# Altium footprint library mod_wireless.PcbLib: 38 footprints (part 2 of 3)
Each footprint in its own frame and in the unit in brackets; x right, y up, seen from the top. Pads: shape width x height; smd on the part's side, far side on the other; paste and mask are expansions set on the pad; w line width, h text height; cw(c..) or ccw(c..) is an arc to the next point about the centre after c.
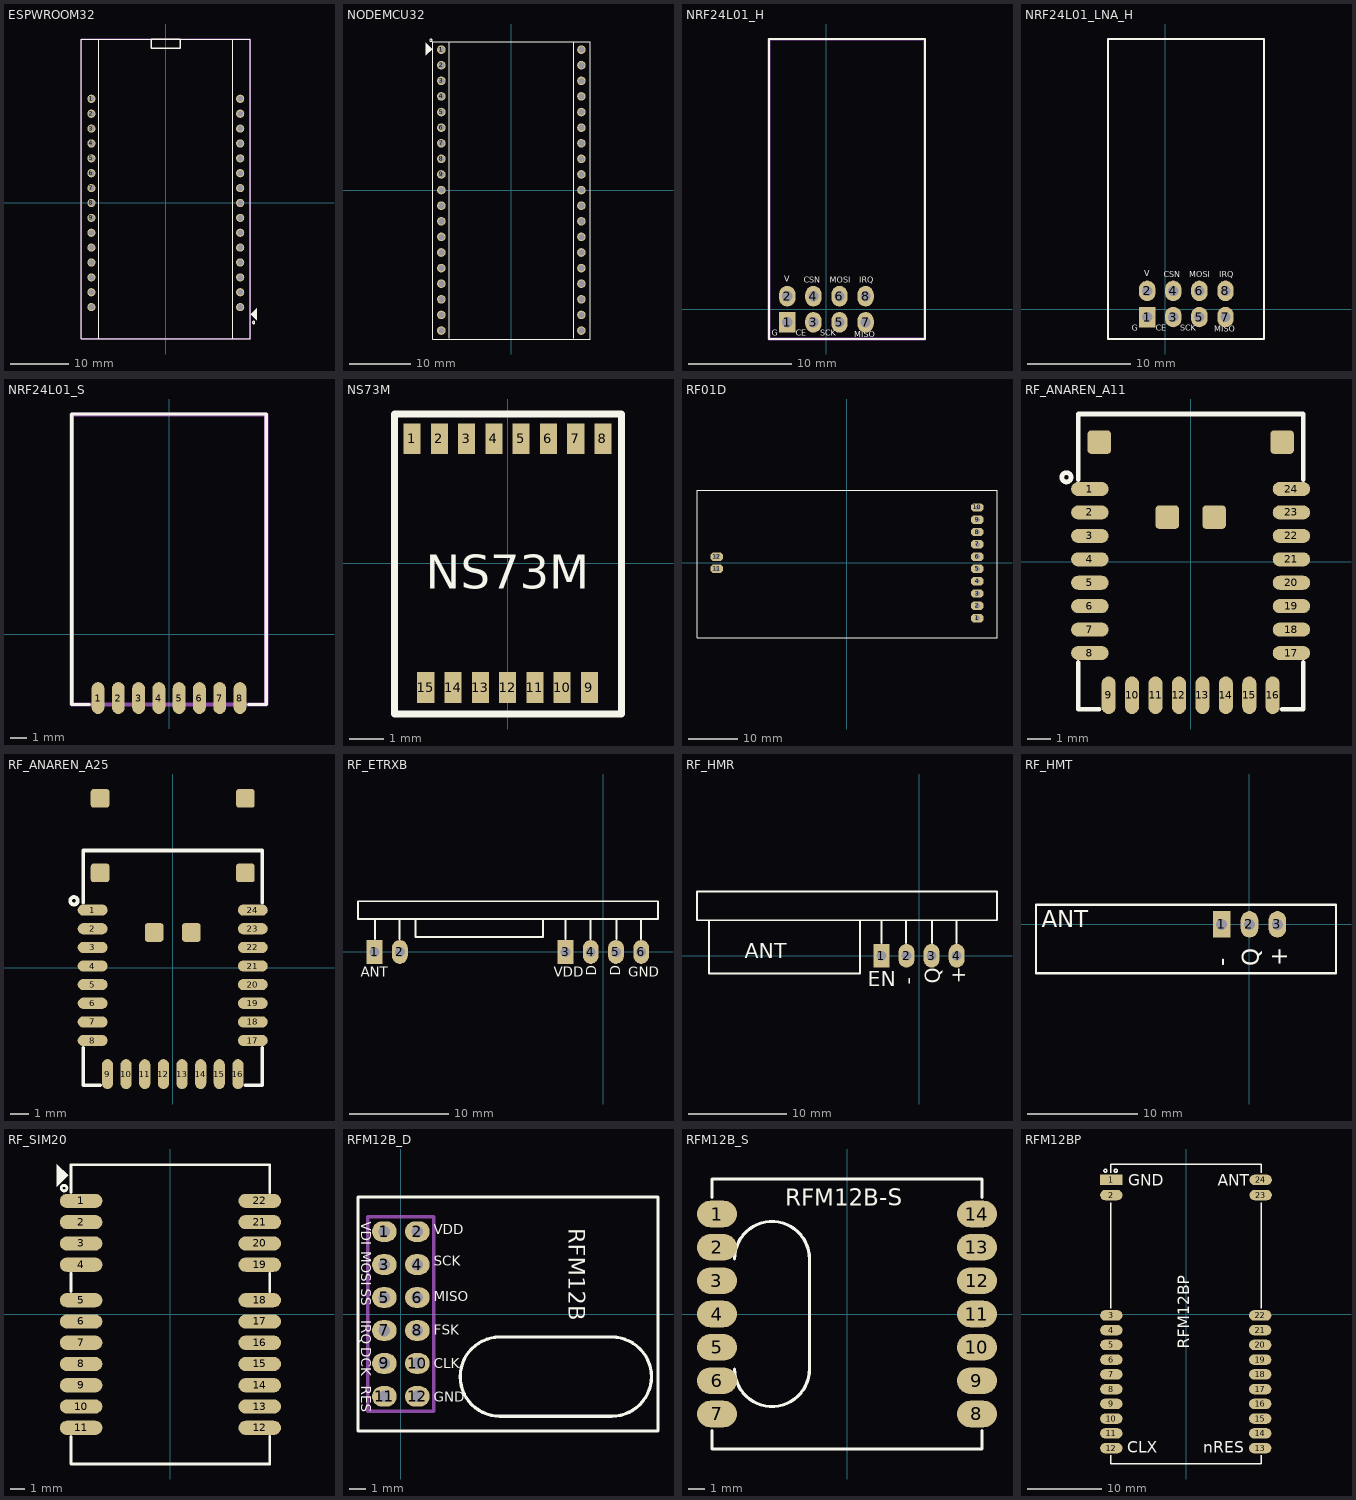
[diagram p1: the footprints below, top view; thin cyan lines are the x and y axes]

## ESPWROOM32 [mm] "ESP-WROOM-32"
pads (30):
  round 1.4 / inner round 1.4 / far side oval 2.2x1.4 hole 1: 1(-12.7,17.78) 2(-12.7,15.24) 3(-12.7,12.7) 4(-12.7,10.16) 5(-12.7,7.62) 6(-12.7,5.08) 7(-12.7,2.54) 8(-12.7,0) 9(-12.7,-2.54) 10(-12.7,-5.08) 11(-12.7,-7.62) 12(-12.7,-10.16) 13(-12.7,-12.7) 14(-12.7,-15.24) 15(-12.7,-17.78) 16(12.7,-17.78) 17(12.7,-15.24) 18(12.7,-12.7) 19(12.7,-10.16) 20(12.7,-7.62) 21(12.7,-5.08) 22(12.7,-2.54) 23(12.7,0) 24(12.7,2.54) 25(12.7,5.08) 26(12.7,7.62) 27(12.7,10.16) 28(12.7,12.7) 29(12.7,15.24) 30(12.7,17.78)
Top Overlay:
  circle w0.2: c15,-20.41 r0.2
  region: 14.5,-18.98 15.5,-19.98 15.5,-17.98
  lines w0.2: -11.43,-23.22 -11.43,27.98 ; 11.43,-23.22 11.43,27.98 ; -14.4,-23.22 14.4,-23.22 14.4,27.98 -14.4,27.98 -14.4,-23.22
  lines w0.254: -0.011,26.427 -2.453,26.427 -2.453,27.98 0,27.98 2.453,27.98 2.453,26.427 0.011,26.427
Top Component (Mech14):
  lines w0.254: -14.402,-23.19 -14.376,-23.216 14.376,-23.216 14.376,27.991 14.351,27.965 -14.376,27.965 -14.402,27.94 -14.402,-23.19
  text ".Designator" at 0.838,0.559 h2.03
3D body "PBD-2.stp": height 8.5, standoff -3.15, extent 11.43,-16.49 13.97,-11.41
3D body "PBD-2.stp": height 8.5, standoff -3.15, extent -13.97,-16.49 -11.43,-11.41
3D body "PBD-2.stp": height 8.5, standoff -3.15, extent -13.97,-11.41 -11.43,-6.33
3D body "PBD-2.stp": height 8.5, standoff -3.15, extent -13.97,-6.33 -11.43,-1.25
3D body "PBD-2.stp": height 8.5, standoff -3.15, extent -13.97,-1.25 -11.43,3.83
3D body "PBD-2.stp": height 8.5, standoff -3.15, extent -13.97,3.83 -11.43,8.91
3D body "PBD-2.stp": height 8.5, standoff -3.15, extent -13.97,8.91 -11.43,13.99
3D body "PBD-2.stp": height 8.5, standoff -3.15, extent -13.97,13.99 -11.43,19.07
3D body "PBS-1.stp": height 8.5, standoff -3.15, extent -13.97,-19.01 -11.43,-16.47
3D body "PBS-1.stp": height 8.5, standoff -3.15, extent 11.43,-19.01 13.97,-16.47
3D body "PBD-2.stp": height 8.5, standoff -3.15, extent 11.43,13.99 13.97,19.07
3D body "PBD-2.stp": height 8.5, standoff -3.15, extent 11.43,8.91 13.97,13.99
3D body "PBD-2.stp": height 8.5, standoff -3.15, extent 11.43,3.83 13.97,8.91
3D body "PBD-2.stp": height 8.5, standoff -3.15, extent 11.43,-1.25 13.97,3.83
3D body "PBD-2.stp": height 8.5, standoff -3.15, extent 11.43,-6.33 13.97,-1.25
3D body "PBD-2.stp": height 8.5, standoff -3.15, extent 11.43,-11.41 13.97,-6.33
3D body "ESP-32_v1.STEP": height 15.9, standoff 3.5, extent -14.25,-22.95 14.25,27.98

## NODEMCU32 [mm] "NodeMCU-32s ESP-32s, 48.26x25.4mm"
pads (38):
  round 1.4 / inner round 1.4 / far side oval 2.2x1.4 hole 1: 1(-11.4,22.9) 2(-11.4,20.36) 3(-11.4,17.82) 4(-11.4,15.28) 5(-11.4,12.74) 6(-11.4,10.2) 7(-11.4,7.66) 8(-11.4,5.12) 9(-11.4,2.58) 10(-11.4,0.04) 11(-11.4,-2.5) 12(-11.4,-5.04) 13(-11.4,-7.58) 14(-11.4,-10.12) 15(-11.4,-12.66) 16(-11.4,-15.2) 17(-11.4,-17.74) 18(-11.4,-20.28) 19(-11.4,-22.82) 20(11.4,-22.82) 21(11.4,-20.28) 22(11.4,-17.74) 23(11.4,-15.2) 24(11.4,-12.66) 25(11.4,-10.12) 26(11.4,-7.58) 27(11.4,-5.04) 28(11.4,-2.5) 29(11.4,0.04) 30(11.4,2.58) 31(11.4,5.12) 32(11.4,7.66) 33(11.4,10.2) 34(11.4,12.74) 35(11.4,15.28) 36(11.4,17.82) 37(11.4,20.36) 38(11.4,22.9)
Top Overlay:
  circle w0.2: c-13.1,24.43 r0.2
  region: -12.9,23 -13.9,24 -13.9,22
  lines w0.2: -10.13,-24.09 -10.13,24.17 ; 10.13,-24.09 10.13,24.17 ; -12.8,-24.2 12.8,-24.2 12.8,24.2 -12.8,24.2 -12.8,-24.2
3D body "PBD-2.stp": height 8.5, standoff -3.15, extent 10.13,-21.55 12.67,-16.47
3D body "PBD-2.stp": height 8.5, standoff -3.15, extent 10.13,-16.47 12.67,-11.39
3D body "PBD-2.stp": height 8.5, standoff -3.15, extent 10.13,-11.39 12.67,-6.31
3D body "PBD-2.stp": height 8.5, standoff -3.15, extent 10.13,-6.31 12.67,-1.23
3D body "PBD-2.stp": height 8.5, standoff -3.15, extent 10.13,-1.23 12.67,3.85
3D body "PBD-2.stp": height 8.5, standoff -3.15, extent 10.13,3.85 12.67,8.93
3D body "PBD-2.stp": height 8.5, standoff -3.15, extent 10.13,8.93 12.67,14.01
3D body "PBD-2.stp": height 8.5, standoff -3.15, extent 10.13,14.01 12.67,19.09
3D body "PBD-2.stp": height 8.5, standoff -3.15, extent 10.13,19.09 12.67,24.17
3D body "PBS-1.stp": height 8.5, standoff -3.15, extent 10.13,-24.09 12.67,-21.55
3D body "PBS-1.stp": height 8.5, standoff -3.15, extent -12.67,-24.09 -10.13,-21.55
3D body "PBD-2.stp": height 8.5, standoff -3.15, extent -12.67,19.09 -10.13,24.17
3D body "PBD-2.stp": height 8.5, standoff -3.15, extent -12.67,14.01 -10.13,19.09
3D body "PBD-2.stp": height 8.5, standoff -3.15, extent -12.67,8.93 -10.13,14.01
3D body "PBD-2.stp": height 8.5, standoff -3.15, extent -12.67,3.85 -10.13,8.93
3D body "PBD-2.stp": height 8.5, standoff -3.15, extent -12.67,-1.23 -10.13,3.85
3D body "PBD-2.stp": height 8.5, standoff -3.15, extent -12.67,-6.31 -10.13,-1.23
3D body "PBD-2.stp": height 8.5, standoff -3.15, extent -12.67,-11.39 -10.13,-6.31
3D body "PBD-2.stp": height 8.5, standoff -3.15, extent -12.67,-16.47 -10.13,-11.39
3D body "PBD-2.stp": height 8.5, standoff -3.15, extent -12.67,-21.55 -10.13,-16.47
3D body "User Library-ESP32S Dev Board 0_9inch width ASSY.step": height 17.6, standoff 4.46, extent -12.954,-24.257 12.954,25.057

## NRF24L01_H [mm] "MODULE, WIRELESS, NRF24L01 HEADER 2X8"
pads (8):
  rect 1.6x2 hole 1: 1(-3.81,-1.27)
  oval 1.6x2 hole 1: 2(-3.81,1.27) 3(-1.27,-1.27) 4(-1.27,1.27) 5(1.27,-1.27) 6(1.27,1.27) 7(3.81,-1.27) 8(3.81,1.27)
Top Overlay:
  lines w0.2: -5.6,-2.9 9.6,-2.9 9.6,26.3 -5.6,26.3 -5.6,-2.9
  text "V" at -4.1,2.5 h1
  text "G" at -5.3,-2.8 h1
  text "CSN" at -2.2,2.4 h1
  text "CE" at -3,-2.8 h1
  text "SCK" at -0.6,-2.8 h1
  text "MISO" at 2.7,-2.9 h1
  text "MOSI" at 0.3,2.4 h1
  text "IRQ" at 3.2,2.4 h1
Top Component (Mech14):
  lines w0.254: -5.588,-2.896 -5.588,26.289 9.576,26.289 9.576,-2.896 -5.588,-2.896
  text ".Designator" at -1.245,-0.584 h2.03
3D body "NRF24L01P.STEP": height 3.5, standoff -11.41, extent -5.468,-2.794 9.532,26.206

## NRF24L01_LNA_H [mm] "MODULE, WIRELESS, NRF24L01 HEADER 2X8"
pads (8):
  rect 1.6x2 hole 1: 1(-1.778,-0.762)
  oval 1.6x2 hole 1: 2(-1.778,1.778) 3(0.762,-0.762) 4(0.762,1.778) 5(3.302,-0.762) 6(3.302,1.778) 7(5.842,-0.762) 8(5.842,1.778)
Top Overlay:
  lines w0.2: -5.6,-2.9 -5.6,26.3 9.6,26.3 9.6,-2.9 -5.6,-2.9
  text "IRQ" at 5.232,2.908 h1
  text "MOSI" at 2.332,2.908 h1
  text "MISO" at 4.732,-2.392 h1
  text "SCK" at 1.432,-2.292 h1
  text "CE" at -0.968,-2.292 h1
  text "CSN" at -0.168,2.908 h1
  text "G" at -3.268,-2.292 h1
  text "V" at -2.068,3.008 h1
3D body "User Library-NRF24+SMA.STEP": height 92.98, standoff -4.55, extent -5.715,-2.921 9.685,71.939

## NRF24L01_S [mm] "MODULE, WIRELESS, NRF24L01+ smd Module"
pads (8):
  oval 0.8x2 smd: 1(-4.445,-4) 2(-3.175,-4) 3(-1.905,-4) 4(-0.635,-4) 5(0.635,-4) 6(1.905,-4) 7(3.175,-4) 8(4.445,-4)
Top Overlay:
  lines w0.2: -5,-4.4 -6.1,-4.4 -6.1,13.8 6.1,13.8 6.1,-4.4 5,-4.4
Top Component (Mech14):
  lines w0.254: -6.096,-4.394 6.096,-4.394 6.096,13.767 -6.096,13.767 -6.096,-4.394
  text ".Designator" at -0.991,-0.584 h2.03
3D body "NRF24L01+ smd Module.step": height 0.8, standoff 0, extent -6,-4.3 6,13.7

## NS73M [mm]
pads (15):
  rect 0.5x0.9 smd: 1(-2.8,3.65) 2(-2,3.65) 3(-1.2,3.65) 4(-0.4,3.65) 5(0.4,3.65) 6(1.2,3.65) 7(2,3.65) 8(2.8,3.65) 9(2.4,-3.65) 10(1.6,-3.65) 11(0.8,-3.65) 12(0,-3.65) 13(-0.8,-3.65) 14(-1.6,-3.65) 15(-2.4,-3.65)
Top Overlay:
  lines w0.2: -3.321,-4.427 3.347,-4.427 3.347,4.374 -3.321,4.374 -3.321,-4.427
  text "NS73M" at -2.394,-0.757 h1

## RF01D [mm]
pads (12):
  oct 2.5x1.7 hole 1: 1(26.5,-11.25) 2(26.5,-8.75) 3(26.5,-6.25) 4(26.5,-3.75) 5(26.5,-1.25) 6(26.5,1.25) 7(26.5,3.75) 8(26.5,6.25) 9(26.5,8.75) 10(26.5,11.25) 11(-26.5,-1.25) 12(-26.5,1.25)
Top Overlay:
  lines w0.25: -30.5,-15.25 -30.5,14.75 30.5,14.75 30.5,-15.25 -30.5,-15.25

## RF_ANAREN_A11 [mm] "RF MODULE, ANAREN, 2.4GHz,"
pads (28):
  oval 1.6x0.6 smd mask+0.1: 1(-4.3,3.1) 2(-4.3,2.1) 3(-4.3,1.1) 4(-4.3,0.1) 5(-4.3,-0.9) 6(-4.3,-1.9) 7(-4.3,-2.9) 8(-4.3,-3.9) 17(4.3,-3.9) 18(4.3,-2.9) 19(4.3,-1.9) 20(4.3,-0.9) 21(4.3,0.1) 22(4.3,1.1) 23(4.3,2.1) 24(4.3,3.1)
  oval 0.6x1.6 smd mask+0.1: 9(-3.5,-5.7) 10(-2.5,-5.7) 11(-1.5,-5.7) 12(-0.5,-5.7) 13(0.5,-5.7) 14(1.5,-5.7) 15(2.5,-5.7) 16(3.5,-5.7)
  rrect30% 1x1 smd mask+0.1: ""(-3.9,5.1) ""(-1,1.9) ""(1,1.9) ""(3.9,5.1)
Top Overlay:
  circle w0.2: c-5.3,3.6 r0.2
  lines w0.2: -4.8,-4.3 -4.8,-6.3 -3.9,-6.3 ; -4.8,3.5 -4.8,6.3 4.8,6.3 4.8,3.5 ; 3.9,-6.3 4.8,-6.3 4.8,-4.3
3D body: height 1, standoff 0, extent -4.7,-6.2 4.7,6.2
3D body: height 2.5, standoff 1, extent -4,-5.5 4,2.5

## RF_ANAREN_A25 [mm] "RF MODULE, ANAREN, 2.4GHz,"
pads (30):
  oval 1.6x0.6 smd mask+0.1: 1(-4.3,3.1) 2(-4.3,2.1) 3(-4.3,1.1) 4(-4.3,0.1) 5(-4.3,-0.9) 6(-4.3,-1.9) 7(-4.3,-2.9) 8(-4.3,-3.9) 17(4.3,-3.9) 18(4.3,-2.9) 19(4.3,-1.9) 20(4.3,-0.9) 21(4.3,0.1) 22(4.3,1.1) 23(4.3,2.1) 24(4.3,3.1)
  oval 0.6x1.6 smd mask+0.1: 9(-3.5,-5.7) 10(-2.5,-5.7) 11(-1.5,-5.7) 12(-0.5,-5.7) 13(0.5,-5.7) 14(1.5,-5.7) 15(2.5,-5.7) 16(3.5,-5.7)
  rrect30% 1x1 smd mask+0.1: ""(-3.9,5.1) ""(-1,1.9) ""(1,1.9) ""(3.9,5.1)
  rrect30% 1x1 smd: ""(-3.9,9.1) ""(3.9,9.1)
Top Overlay:
  circle w0.2: c-5.3,3.6 r0.2
  lines w0.2: -4.8,-4.3 -4.8,-6.3 -3.9,-6.3 ; -4.8,3.5 -4.8,6.3 4.8,6.3 4.8,3.5 ; 3.9,-6.3 4.8,-6.3 4.8,-4.3
3D body: height 2.5, standoff 1, extent -4,-5.5 4,2.5
3D body: height 1, standoff 0, extent -4.7,-6.2 4.7,6.2

## RF_ETRXB [mm] "Module RF, Receiver, ET-RXB-12, ET-RXB-22"
pads (6):
  rect 1.6x2.4 hole 1: 1(-23.03,0) 3(-3.81,0)
  oval 1.6x2.4 hole 1: 2(-20.49,0) 4(-1.27,0) 5(1.27,0) 6(3.81,0)
Top Overlay:
  lines w0.2: -23,1.3 -23,3.3 ; -20.5,1.3 -20.5,3.3 ; -18.9,3.3 -18.9,1.5 -6.1,1.5 -6.1,3.3 ; -3.8,1.3 -3.8,3.3 ; -1.3,1.3 -1.3,3.3 ; 1.3,1.3 1.3,3.3 ; 3.8,1.3 3.8,3.3 ; -24.7,3.3 -24.7,5.1 5.5,5.1 5.5,3.3 -24.7,3.3
  text "VDD" at -5,-2.5 h1
  text "D" at -0.7,-2.4 h1
  text "D" at 1.7,-2.4 h1
  text "GND" at 2.5,-2.5 h1
  text "ANT" at -24.4,-2.5 h1
3D body "RF_ETRXB.step": height 8.5, standoff -6.05, extent -24.6,-2.05 5.4,6.4

## RF_HMR [mm] "Module RF, Receiver, HM-R"
pads (4):
  rect 1.6x2.4 hole 1: 1(-3.81,0)
  oval 1.6x2.4 hole 1: 2(-1.27,0) 3(1.27,0) 4(3.81,0)
Top Overlay:
  lines w0.2: -21.3,3.6 -21.3,-1.8 -6,-1.8 -6,3.6 ; -3.8,1.3 -3.8,3.6 ; -1.3,1.3 -1.3,3.6 ; 1.3,1.3 1.3,3.6 ; 3.8,1.3 3.8,3.6 ; -22.5,3.6 -22.5,6.5 7.9,6.5 7.9,3.6 -22.5,3.6
  text "EN" at -5.2,-3.1 h1.52
  text "-" at -0.381,-2.937 h1.52
  text "Q" at 2.159,-2.81 h1.52
  text "+" at 4.699,-2.81 h1.52
  text "ANT" at -17.653,-0.254 h1.52
3D body "User Library-XD-RF-5V.STEP": height 14.75, standoff -4.25, extent -22.3,-1.7 7.7,6.3

## RF_HMT [mm] "Module RF, Transmitter, HM-T"
pads (3):
  rect 1.6x2.4 hole 1: 1(-2.54,0)
  oval 1.6x2.4 hole 1: 2(0,0) 3(2.54,0)
Top Overlay:
  lines w0.2: 7.839,-4.445 -19.431,-4.445 -19.431,1.778 7.874,1.778 7.874,-4.445
  text "-" at -1.778,-3.81 h1.52
  text "Q" at 0.889,-3.81 h1.52
  text "+" at 3.429,-3.81 h1.52
  text "ANT" at -18.923,-0.254 h1.52

## RF_SIM20 [mm] "RF MODULE, SIMCOM SIM20"
pads (22):
  oval 3x1 smd: 1(-6.3,8) 2(-6.3,6.5) 3(-6.3,5) 4(-6.3,3.5) 5(-6.3,1) 6(-6.3,-0.5) 7(-6.3,-2) 8(-6.3,-3.5) 9(-6.3,-5) 10(-6.3,-6.5) 11(-6.3,-8) 12(6.3,-8) 13(6.3,-6.5) 14(6.3,-5) 15(6.3,-3.5) 16(6.3,-2) 17(6.3,-0.5) 18(6.3,1) 19(6.3,3.5) 20(6.3,5) 21(6.3,6.5) 22(6.3,8)
Top Overlay:
  circle w0.2: c-7.5,8.9 r0.2
  region: -7.2,9.8 -8,10.6 -8,9
  lines w0.2: -7,-8.6 -7,-10.55 7,-10.55 7,-8.6 ; -7,1.6 -7,2.9 ; -7,8.6 -7,10.55 7,10.55 7,8.6 ; 7,1.6 7,2.9
3D body "SIM20.step": height 2.75, standoff 0, extent -6.9,-10.5 6.9,10.5

## RFM12B_D [mm] "MODULE, WIRELESS, RFM12B-D"
pads (12):
  oval 1.5x1.25 hole 0.7: 1(-1,5) 2(1,5) 3(-1,3) 4(1,3) 5(-1,1) 6(1,1) 7(-1,-1) 8(1,-1) 9(-1,-3) 10(1,-3) 11(-1,-5) 12(1,-5)
Top Overlay:
  lines w0.2: -2.6,-7.1 15.6,-7.1 15.6,7.1 -2.6,7.1 -2.6,-7.1 ; 6,-6.2 cw(c6,-3.8) 6,-1.4 12.8,-1.4 cw(c12.8,-3.8) 12.8,-6.2 6,-6.2
  text "RFM12B" at 10.2,5.2 h1
  text "VDI" at -2.4,5.588 h0.6
  text "MOSI" at -2.4,3.81 h0.6
  text "SS" at -2.4,1.524 h0.6
  text "IRQ" at -2.4,-0.381 h0.6
  text "DCK" at -2.4,-2.032 h0.6
  text "RES" at -2.4,-4.351 h0.6
  text "GND" at 2,-5.334 h0.6
  text "CLK" at 2,-3.302 h0.6
  text "FSK" at 2,-1.27 h0.6
  text "MISO" at 2,0.762 h0.6
  text "SCK" at 2,2.921 h0.6
  text "VDD" at 2,4.826 h0.6
Mechanical 1:
  lines w0.2: -2,-5.9 -2,5.9 2,5.9 2,-5.9 -2,-5.9
3D body "HC-49_LT_THT_16MHz.step": height 8.99, standoff 3.4, extent 3.725,-6.125 15.075,-1.475
3D body "female_header_a-bl200-dg-g06d.stp": height 4, standoff -2.8, extent -2.25,-0.25 2.25,6.25
3D body "female_header_a-bl200-dg-g06d.stp": height 4, standoff -2.8, extent -2.25,-6.25 2.25,0.25
3D body "pin_header_a-sl200-dg-g06d.stp": height 9.8, standoff 1, extent -2,0.05 2,5.95
3D body "pin_header_a-sl200-dg-g06d.stp": height 9.8, standoff 1, extent -2,-5.95 2,-0.05
3D body: height 8.2, standoff 7, extent -2.5,-7 15.5,7

## RFM12B_S [mm] "MODULE, WIRELESS, RFM12B-S"
pads (14):
  oval 2.4x1.6 smd: 1(-7.8,6) 2(-7.8,4) 3(-7.8,2) 4(-7.8,0) 5(-7.8,-2) 6(-7.8,-4) 7(-7.8,-6) 8(7.8,-6) 9(7.8,-4) 10(7.8,-2) 11(7.8,0) 12(7.8,2) 13(7.8,4) 14(7.8,6)
Top Overlay:
  lines w0.2: -8.1,-7 -8.1,-8.1 8.1,-8.1 8.1,-7 ; -8.1,7 -8.1,8.1 8.1,8.1 8.1,7 ; -6.75,-3.302 ccw(c-4.5,-3.302) -2.25,-3.302 -2.25,3.302 ccw(c-4.5,3.302) -6.75,3.302
  text "RFM12B-S" at -3.7,6.5 h1
3D body "RFM12BS.STEP": height 4.2, standoff 0.05, extent -7.96,-8.05 7.96,8.05

## RFM12BP [mm]
pads (24):
  rect 3x1.4 smd: 1(-10,17.97)
  oval 3x1.4 smd: 2(-10,15.938) 3(-10,-0.191) 4(-10,-2.166) 5(-10,-4.142) 6(-10,-6.117) 7(-10,-8.093) 8(-10,-10.068) 9(-10,-12.044) 10(-10,-14.019) 11(-10,-15.995) 12(-10,-17.97) 13(9.939,-17.97) 14(9.939,-15.995) 15(9.939,-14.019) 16(9.939,-12.044) 17(9.939,-10.068) 18(9.939,-8.093) 19(9.939,-6.117) 20(9.939,-4.142) 21(9.939,-2.166) 22(9.939,-0.191) 23(10,15.938) 24(10,17.97)
Top Overlay:
  circle w0.2: c-9.4,19.2 r0.2
  circle w0.2: c-10.8,19.2 r0.2
  lines w0.2: -10.1,-18.9 -10.1,-20.1 10.1,-20.1 10.1,-18.9 ; -10.1,0.8 -10.1,14.9 ; -10.1,18.9 -10.1,20.1 10.1,20.1 10.1,18.9 ; 10.1,0.8 10.1,14.9
  text "RFM12BP" at 0.414,-4.635 h1.52
  text "GND" at -7.714,17.209 h1.52
  text "ANT" at 4.224,17.209 h1.52
  text "nRES" at 2.319,-18.605 h1.52
  text "CLX" at -7.841,-18.605 h1.52
3D body: height 3, standoff -0.6, extent -10,-20 10,20